# Altium schematic symbol library GESTURECONTROLLEDCAR.SchLib: 1 symbol
Pins are listed as number, name and electrical type; pins without a type are passive.

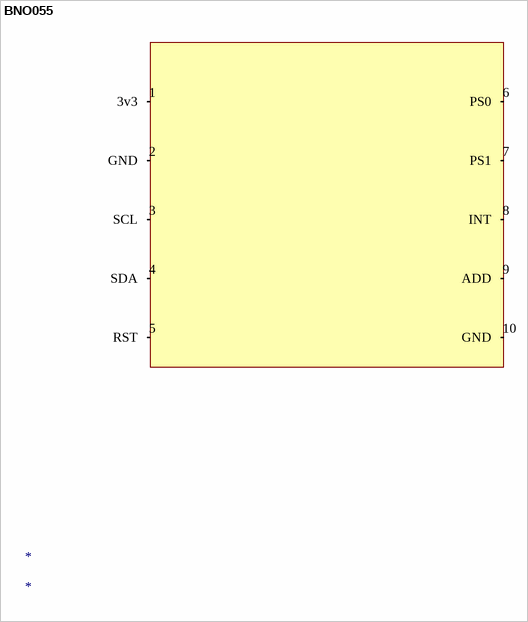
[diagram p0: symbol BNO055]

## BNO055
designator *
pins: 1 3v3, 2 GND, 3 SCL, 4 SDA, 5 RST, 6 PS0, 7 PS1, 8 INT, 9 ADD, 10 GND